# Altium footprint library PcbLib1.PcbLib: 332 footprints (part 9 of 22)
Each footprint in its own frame and in the unit in brackets; x right, y up, seen from the top. Pads: shape width x height; smd on the part's side, far side on the other; paste and mask are expansions set on the pad; w line width, h text height; cw(c..) or ccw(c..) is an arc to the next point about the centre after c.
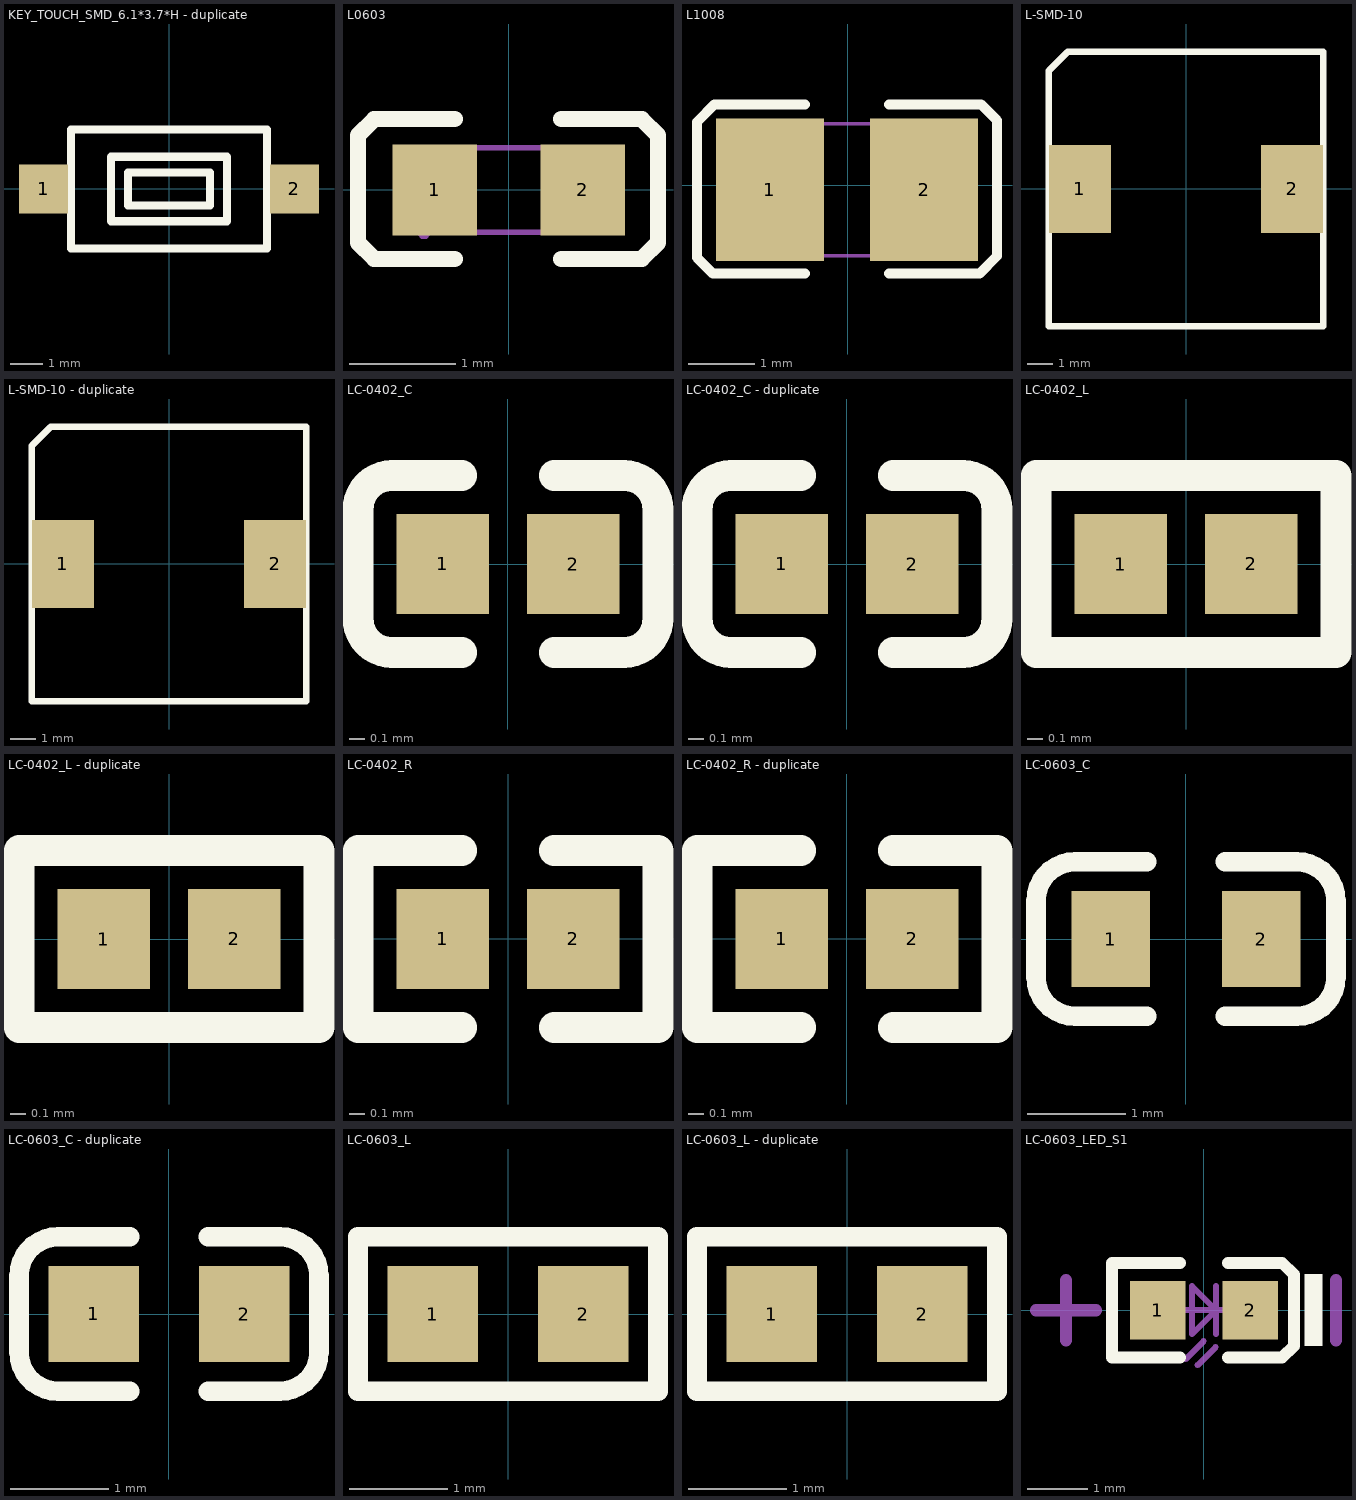
[diagram p8: the footprints below, top view; thin cyan lines are the x and y axes]

## KEY_TOUCH_SMD_6.1*3.7*H - duplicate [mil]
pads (2):
  rect 60x60 smd: 1(-153.54,0) 2(153.54,0)
Top Overlay:
  lines w10: -120.08,-72.83 120.08,-72.83 120.08,72.83 -120.08,72.83 -120.08,-72.83 ; -70.87,-39.37 -70.87,39.37 70.87,39.37 70.87,-39.37 -70.87,-39.37 ; -50,-20 50,-20 50,20 -50,20 -50,-20

## L0603 [mm]
pads (2):
  rect 0.8x0.864 smd paste-100 mask+0.051: 1(-0.7,0) 2(0.7,0)
Top Overlay:
  lines w0.152: -0.51,-0.651 -1.272,-0.651 -1.424,-0.499 -1.424,0.517 -1.272,0.67 -0.51,0.67 ; 0.496,-0.651 1.258,-0.651 1.411,-0.499 1.411,0.517 1.258,0.67 0.496,0.67
Top Paste:
  region: 0.264,0.154 0.264,-0.122 0.538,-0.416 1.042,-0.416 1.106,-0.352 1.106,0.384 1.042,0.448 0.538,0.448
  region: -0.252,0.143 -0.252,-0.134 -0.526,-0.427 -1.029,-0.427 -1.093,-0.363 -1.093,0.373 -1.029,0.437 -0.526,0.437
Mechanical 15:
  region: -0.5,-0.4 -0.8,-0.4 -0.8,0.4 -0.5,0.4
  region: 0.8,-0.4 0.5,-0.4 0.5,0.4 0.8,0.4
  region: -0.74,-0.4 -0.74,-0.375 -0.775,-0.34 -0.825,-0.34 -0.86,-0.375 -0.86,-0.4 -0.86,-0.425 -0.825,-0.46 -0.775,-0.46 -0.74,-0.425 -0.74,-0.4
  lines w0.051: -0.8,-0.4 -0.8,0.4 0.8,0.4 0.8,-0.4 -0.8,-0.4

## L1008 [mm]
pads (2):
  rect 1.635x2.16 smd paste-100 mask+0.051: 1(-1.18,-0.067) 2(1.155,-0.067)
Top Overlay:
  lines w0.152: -0.648,-1.337 -2.045,-1.337 -2.286,-1.096 -2.286,0.962 -2.019,1.228 -0.648,1.228 ; 0.622,-1.337 1.994,-1.337 2.261,-1.07 2.261,0.987 2.019,1.228 0.622,1.228
Top Paste:
  region: -0.328,-1.047 -0.328,-0.534 -0.428,-0.434 -0.819,-0.434 -0.919,-0.334 -0.919,0.2 -0.819,0.3 -0.428,0.3 -0.328,0.4 -0.328,0.913 -0.428,1.013 -1.898,1.013 -1.998,0.913 -1.998,-1.047 -1.898,-1.147 -0.428,-1.147
  region: 0.302,-1.047 0.302,-0.534 0.402,-0.434 0.793,-0.434 0.893,-0.334 0.893,0.2 0.793,0.3 0.402,0.3 0.302,0.4 0.302,0.913 0.402,1.013 1.872,1.013 1.972,0.913 1.972,-1.047 1.872,-1.147 0.402,-1.147
Mechanical 6:
  lines w0.051: -1.263,-1.067 1.237,-1.067 1.237,0.933 -1.263,0.933 -1.263,-1.067
Mechanical 8:
  region: -1.203,-1.067 -1.203,-1.092 -1.238,-1.127 -1.288,-1.127 -1.323,-1.092 -1.323,-1.067 -1.323,-1.042 -1.288,-1.007 -1.238,-1.007 -1.203,-1.042 -1.203,-1.067
Mechanical 9:
  region: -1.263,0.933 -0.763,0.933 -0.763,-1.067 -1.263,-1.067
  region: 0.737,0.933 1.237,0.933 1.237,-1.067 0.737,-1.067

## L-SMD-10 [mm]
pads (2):
  rect 2.4x3.4 smd: 1(-4.1,0) 2(4.1,0)
Top Overlay:
  lines w0.254: -5.3,-5.3 5.3,-5.3 5.3,5.3 -4.496,5.3 -4.581,5.3 -5.3,4.581 -5.3,-5.3

## L-SMD-10 - duplicate [mm]
pads (2):
  rect 2.4x3.4 smd: 1(-4.1,0) 2(4.1,0)
Top Overlay:
  lines w0.254: -5.3,-5.3 -5.3,4.581 -4.581,5.3 -4.496,5.3 5.3,5.3 5.3,-5.3 -5.3,-5.3

## LC-0402_C [mm]
height 1.27
pads (2):
  rect 0.6x0.65 smd mask+0.051: 1(-0.425,0) 2(0.425,0)
Top Overlay:
  lines w0.2: -0.755,-0.575 cw(c-0.755,-0.355) -0.975,-0.355 -0.975,0.355 cw(c-0.755,0.355) -0.755,0.575 ; -0.75,-0.575 -0.3,-0.575 ; -0.75,0.575 -0.3,0.575 ; 0.3,-0.575 0.75,-0.575 ; 0.3,0.575 0.75,0.575 ; 0.755,-0.575 ccw(c0.755,-0.355) 0.975,-0.355 0.975,0.355 ccw(c0.755,0.355) 0.755,0.575
3D body "0402 SMD Capacitor.step": height 0.2, standoff 0, extent -0.483,-0.3 0.518,0.3

## LC-0402_C - duplicate [mm]
height 1.27
pads (2):
  rect 0.6x0.65 smd mask+0.051: 1(-0.425,0) 2(0.425,0)
Top Overlay:
  lines w0.2: -0.755,-0.575 cw(c-0.755,-0.355) -0.975,-0.355 -0.975,0.355 cw(c-0.755,0.355) -0.755,0.575 ; -0.75,-0.575 -0.3,-0.575 ; -0.75,0.575 -0.3,0.575 ; 0.3,-0.575 0.75,-0.575 ; 0.3,0.575 0.75,0.575 ; 0.755,-0.575 ccw(c0.755,-0.355) 0.975,-0.355 0.975,0.355 ccw(c0.755,0.355) 0.755,0.575
3D body "0402 SMD Capacitor.step": height 0.2, standoff 0, extent -0.483,-0.3 0.518,0.3

## LC-0402_L [mm]
height 1.27
pads (2):
  rect 0.6x0.65 smd mask+0.051: 1(-0.425,0) 2(0.425,0)
Top Overlay:
  lines w0.2: 0.965,-0.575 -0.975,-0.575 -0.975,0.575 0.965,0.575 ; 0.975,-0.575 0.975,0.575
3D body "User Library-RES_1005-0402.STEP": height 0.41, standoff 0, extent -0.575,-0.275 0.575,0.275

## LC-0402_L - duplicate [mm]
height 1.27
pads (2):
  rect 0.6x0.65 smd mask+0.051: 1(-0.425,0) 2(0.425,0)
Top Overlay:
  lines w0.2: 0.965,-0.575 -0.975,-0.575 -0.975,0.575 0.965,0.575 ; 0.975,-0.575 0.975,0.575
3D body "User Library-RES_1005-0402.STEP": height 0.41, standoff 0, extent -0.575,-0.275 0.575,0.275

## LC-0402_R [mm]
height 1.27
pads (2):
  rect 0.6x0.65 smd mask+0.051: 1(-0.425,0) 2(0.425,0)
Top Overlay:
  lines w0.2: -0.3,-0.575 -0.975,-0.575 -0.975,0.575 -0.3,0.575 ; 0.3,-0.575 0.975,-0.575 0.975,0.575 0.3,0.575
3D body "User Library-RES_1005-0402.STEP": height 0.41, standoff 0, extent -0.575,-0.275 0.575,0.275

## LC-0402_R - duplicate [mm]
height 1.27
pads (2):
  rect 0.6x0.65 smd mask+0.051: 1(-0.425,0) 2(0.425,0)
Top Overlay:
  lines w0.2: -0.3,-0.575 -0.975,-0.575 -0.975,0.575 -0.3,0.575 ; 0.3,-0.575 0.975,-0.575 0.975,0.575 0.3,0.575
3D body "User Library-RES_1005-0402.STEP": height 0.41, standoff 0, extent -0.575,-0.275 0.575,0.275

## LC-0603_C [mm]
height 1.27
pads (2):
  rect 0.8x0.98 smd: 1(-0.77,0) 2(0.77,0)
Top Overlay:
  lines w0.2: -0.4,-0.79 -1.135,-0.79 cw(c-1.135,-0.39) -1.535,-0.39 -1.535,0.39 cw(c-1.135,0.39) -1.135,0.79 -0.4,0.79 ; 0.4,-0.79 1.135,-0.79 ccw(c1.135,-0.39) 1.535,-0.39 1.535,0.39 ccw(c1.135,0.39) 1.135,0.79 0.4,0.79
3D body "User Library-0603 SMD Capacitor.STEP": height 0.3, standoff 0, extent -0.8,-0.4 0.8,0.4

## LC-0603_C - duplicate [mm]
height 1.27
pads (2):
  rect 0.93x0.98 smd: 1(-0.77,0) 2(0.77,0)
Top Overlay:
  lines w0.2: -0.4,-0.79 -1.135,-0.79 cw(c-1.135,-0.39) -1.535,-0.39 -1.535,0.39 cw(c-1.135,0.39) -1.135,0.79 -0.4,0.79 ; 0.4,-0.79 1.135,-0.79 ccw(c1.135,-0.39) 1.535,-0.39 1.535,0.39 ccw(c1.135,0.39) 1.135,0.79 0.4,0.79
3D body "User Library-0603 SMD Capacitor.STEP": height 0.3, standoff 0, extent -0.8,-0.4 0.8,0.4

## LC-0603_L [mm]
height 1.27
pads (2):
  rect 0.93x0.98 smd: 1(-0.77,0) 2(0.77,0)
Top Overlay:
  lines w0.2: -1.535,-0.79 -1.535,0.79 1.535,0.79 1.535,-0.79 -1.535,-0.79
3D body "L0603.STEP": height 0.46, standoff -0.01, extent -0.825,-0.412 0.825,0.413

## LC-0603_L - duplicate [mm]
height 1.27
pads (2):
  rect 0.93x0.98 smd: 1(-0.77,0) 2(0.77,0)
Top Overlay:
  lines w0.2: -1.535,-0.79 -1.535,0.79 1.535,0.79 1.535,-0.79 -1.535,-0.79
3D body "L0603.STEP": height 0.46, standoff -0.01, extent -0.825,-0.412 0.825,0.413

## LC-0603_LED_S1 [mm]
height 1.27
pads (2):
  rect 0.93x0.98 smd: 1(-0.77,0) 2(0.77,0)
Top Overlay:
  region: 1.975,0.6 1.675,0.6 1.675,-0.6 1.975,-0.6
  lines w0.2: -0.4,-0.79 -1.535,-0.79 -1.535,0.79 -0.4,0.79 ; 0.4,-0.79 1.3,-0.79 1.5,-0.597 1.5,0.597 1.3,0.79 0.4,0.79
Mechanical 13:
  lines w0.1: -0.4,0 0.4,0 ; -0.305,-0.817 -0.005,-0.517 ; -0.105,-0.917 0.195,-0.617 ; 0.2,-0.4 0.2,0.4 ; -0.2,-0.4 -0.2,0.4 0.2,0 -0.2,-0.4
Mechanical 15:
  lines w0.203: -2.8,0 -1.8,0 ; -2.3,-0.5 -2.3,0.5 ; 2.2,-0.5 2.2,0.5
3D body "User Library-LED_0603_R.STEP": height 0.6, standoff 0, extent -0.8,-0.4 0.8,0.4